# Altium schematic symbol library U-Disk UDP.SchLib: 1 symbol
Pins are listed as number, name and electrical type; pins without a type are passive.

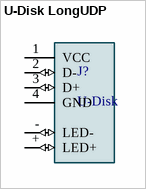
[diagram p0: symbol U-Disk LongUDP]

## U-Disk LongUDP
designator J?, comment U-Disk
U-Disk UDP; MF: Samtec; MP: USBR-A-S-F-O-VU; SnapEDA_Link: https://www.snapeda.com/parts/USBR-A-S-F-O-VU/Samtec%20Inc./view-part/932531/?ref=snap; Price: None; Availability: Unavailable; Package: None; Value: *
footprint U-Disk LongUDP
footprint U-Disk ShortUDP
pins: 1 VCC (power), 2 D- (io), 3 D+ (io), 4 GND (power), + LED+ (io), - LED- (io)